# Altium footprint library TCAL9539RTWR.PcbLib: 3 footprints
Each footprint in its own frame and in the unit in brackets; x right, y up, seen from the top. Pads: shape width x height; smd on the part's side, far side on the other; paste and mask are expansions set on the pad; w line width, h text height; cw(c..) or ccw(c..) is an arc to the next point about the centre after c.
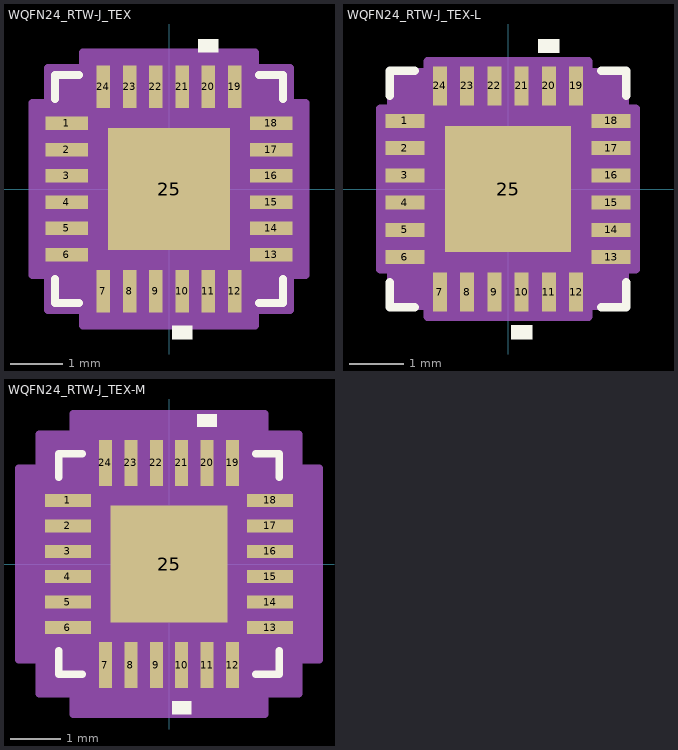
[diagram p0: the footprints below, top view; thin cyan lines are the x and y axes]

## WQFN24_RTW-J_TEX [mm]
pads (25):
  rect 0.808x0.255 smd paste+0 mask+0: 1(-1.941,1.25) 2(-1.941,0.75) 3(-1.941,0.25) 4(-1.941,-0.25) 5(-1.941,-0.75) 6(-1.941,-1.25) 13(1.941,-1.25) 14(1.941,-0.75) 15(1.941,-0.25) 16(1.941,0.25) 17(1.941,0.75) 18(1.941,1.25)
  rect 0.255x0.808 smd paste+0 mask+0: 7(-1.25,-1.941) 8(-0.75,-1.941) 9(-0.25,-1.941) 10(0.25,-1.941) 11(0.75,-1.941) 12(1.25,-1.941) 19(1.25,1.941) 20(0.75,1.941) 21(0.25,1.941) 22(-0.25,1.941) 23(-0.75,1.941) 24(-1.25,1.941)
  rect 2.311x2.311 smd paste+0 mask+0: 25(0,0)
Top Overlay:
  region: 0.44,-2.599 0.059,-2.599 0.059,-2.853 0.44,-2.853
  region: 0.941,2.599 0.56,2.599 0.56,2.853 0.941,2.853
  lines w0.152: -2.172,-1.71 -2.172,-2.172 -1.71,-2.172 ; -2.172,1.71 -2.172,2.172 -1.71,2.172 ; 1.71,-2.172 2.172,-2.172 2.172,-1.71 ; 1.71,2.172 2.172,2.172 2.172,1.71
  text ".Designator" at -3.492,-0.635 h1.27
Mechanical 13:
  lines w0.025: -2.045,0.775 -0.775,2.045 ; -2.045,-2.045 2.045,-2.045 ; -2.045,-2.045 -2.045,2.045 ; -2.045,-2.045 -2.045,-2.045 ; -2.045,-1.402 -2.045,-1.098 ; -2.045,-1.402 -2.045,-1.098 ; -2.045,-1.402 -2.045,-1.402 ; -2.045,-1.098 -2.045,-1.098 ; -2.045,-0.902 -2.045,-0.598 ; -2.045,-0.902 -2.045,-0.598 ; -2.045,-0.902 -2.045,-0.902 ; -2.045,-0.598 -2.045,-0.598 ; -2.045,-0.402 -2.045,-0.098 ; -2.045,-0.402 -2.045,-0.098 ; -2.045,-0.402 -2.045,-0.402 ; -2.045,-0.098 -2.045,-0.098 ; -2.045,0.098 -2.045,0.402 ; -2.045,0.098 -2.045,0.402 ; -2.045,0.098 -2.045,0.098 ; -2.045,0.402 -2.045,0.402 ; -2.045,0.598 -2.045,0.902 ; -2.045,0.598 -2.045,0.902 ; -2.045,0.598 -2.045,0.598 ; -2.045,0.902 -2.045,0.902 ; -2.045,1.098 -2.045,1.402 ; -2.045,1.098 -2.045,1.402 ; -2.045,1.098 -2.045,1.098 ; -2.045,1.402 -2.045,1.402 ; -2.045,2.045 2.045,2.045 ; -2.045,2.045 -2.045,2.045 ; -1.402,-2.045 -1.098,-2.045 ; -1.402,-2.045 -1.402,-2.045 ; -1.402,-2.045 -1.098,-2.045 ; -1.402,2.045 -1.098,2.045 ; -1.402,2.045 -1.098,2.045 ; -1.402,2.045 -1.402,2.045 ; -1.098,-2.045 -1.098,-2.045 ; -1.098,2.045 -1.098,2.045 ; -0.902,-2.045 -0.598,-2.045 ; -0.902,-2.045 -0.902,-2.045 ; -0.902,-2.045 -0.598,-2.045 ; -0.902,2.045 -0.598,2.045 ; -0.902,2.045 -0.598,2.045 ; -0.902,2.045 -0.902,2.045 ; -0.598,-2.045 -0.598,-2.045 ; -0.598,2.045 -0.598,2.045 ; -0.402,-2.045 -0.098,-2.045 ; -0.402,-2.045 -0.402,-2.045 ; -0.402,-2.045 -0.098,-2.045 ; -0.402,2.045 -0.098,2.045 ; -0.402,2.045 -0.098,2.045 ; -0.402,2.045 -0.402,2.045 ; -0.098,-2.045 -0.098,-2.045 ; -0.098,2.045 -0.098,2.045 ; 0.098,-2.045 0.402,-2.045 ; 0.098,-2.045 0.098,-2.045 ; 0.098,-2.045 0.402,-2.045 ; 0.098,2.045 0.402,2.045 ; 0.098,2.045 0.402,2.045 ; 0.098,2.045 0.098,2.045 ; 0.402,-2.045 0.402,-2.045 ; 0.402,2.045 0.402,2.045 ; 0.598,-2.045 0.902,-2.045 ; 0.598,-2.045 0.598,-2.045 ; 0.598,-2.045 0.902,-2.045 ; 0.598,2.045 0.902,2.045 ; 0.598,2.045 0.902,2.045 ; 0.598,2.045 0.598,2.045 ; 0.902,-2.045 0.902,-2.045 ; 0.902,2.045 0.902,2.045 ; 1.098,-2.045 1.402,-2.045 ; 1.098,-2.045 1.098,-2.045 ; 1.098,-2.045 1.402,-2.045 ; 1.098,2.045 1.402,2.045 ; 1.098,2.045 1.402,2.045 ; 1.098,2.045 1.098,2.045 ; 1.402,-2.045 1.402,-2.045 ; 1.402,2.045 1.402,2.045 ; 2.045,-2.045 2.045,-2.045 ; 2.045,-2.045 2.045,2.045 ; 2.045,-1.402 2.045,-1.098 ; 2.045,-1.402 2.045,-1.402 ; 2.045,-1.402 2.045,-1.098 ; 2.045,-1.098 2.045,-1.098 ; 2.045,-0.902 2.045,-0.598 ; 2.045,-0.902 2.045,-0.902 ; 2.045,-0.902 2.045,-0.598 ; 2.045,-0.598 2.045,-0.598 ; 2.045,-0.402 2.045,-0.098 ; 2.045,-0.402 2.045,-0.402 ; 2.045,-0.402 2.045,-0.098 ; 2.045,-0.098 2.045,-0.098 ; 2.045,0.098 2.045,0.402 ; 2.045,0.098 2.045,0.098 ; 2.045,0.098 2.045,0.402 ; 2.045,0.402 2.045,0.402 ; 2.045,0.598 2.045,0.902 ; 2.045,0.598 2.045,0.598 ; 2.045,0.598 2.045,0.902 ; 2.045,0.902 2.045,0.902 ; 2.045,1.098 2.045,1.402 ; 2.045,1.098 2.045,1.098 ; 2.045,1.098 2.045,1.402 ; 2.045,1.402 2.045,1.402 ; 2.045,2.045 2.045,2.045
  text ".Designator" at -3.492,-0.635 h1.27
Mechanical 15:
  region: -1.631,-2.299 -2.299,-2.299 -2.299,-1.631 -2.599,-1.631 -2.599,1.631 -2.299,1.631 -2.299,2.299 -1.631,2.299 -1.631,2.599 1.631,2.599 1.631,2.299 2.299,2.299 2.299,1.631 2.599,1.631 2.599,-1.631 2.299,-1.631 2.299,-2.299 1.631,-2.299 1.631,-2.599 -1.631,-2.599
  lines w0.152: -2.599,-1.631 -2.299,-1.631 -2.299,-2.299 -1.631,-2.299 -1.631,-2.599 1.631,-2.599 1.631,-2.299 2.299,-2.299 2.299,-1.631 2.599,-1.631 2.599,1.631 2.299,1.631 2.299,2.299 1.631,2.299 1.631,2.599 -1.631,2.599 -1.631,2.299 -2.299,2.299 -2.299,1.631 -2.599,1.631 -2.599,-1.631
3D body "WQFN24_RTW-J_TEX.step": height 0.81, standoff 0, extent -2.045,-2.045 2.045,2.045

## WQFN24_RTW-J_TEX-L [mm]
pads (25):
  rect 0.708x0.255 smd paste+0 mask+0: 1(-1.891,1.25) 2(-1.891,0.75) 3(-1.891,0.25) 4(-1.891,-0.25) 5(-1.891,-0.75) 6(-1.891,-1.25) 13(1.891,-1.25) 14(1.891,-0.75) 15(1.891,-0.25) 16(1.891,0.25) 17(1.891,0.75) 18(1.891,1.25)
  rect 0.255x0.708 smd paste+0 mask+0: 7(-1.25,-1.891) 8(-0.75,-1.891) 9(-0.25,-1.891) 10(0.25,-1.891) 11(0.75,-1.891) 12(1.25,-1.891) 19(1.25,1.891) 20(0.75,1.891) 21(0.25,1.891) 22(-0.25,1.891) 23(-0.75,1.891) 24(-1.25,1.891)
  rect 2.311x2.311 smd paste+0 mask+0: 25(0,0)
Top Overlay:
  region: 0.44,-2.499 0.059,-2.499 0.059,-2.753 0.44,-2.753
  region: 0.941,2.499 0.56,2.499 0.56,2.753 0.941,2.753
  lines w0.152: -2.172,-1.71 -2.172,-2.172 -1.71,-2.172 ; -2.172,1.71 -2.172,2.172 -1.71,2.172 ; 1.71,-2.172 2.172,-2.172 2.172,-1.71 ; 1.71,2.172 2.172,2.172 2.172,1.71
  text ".Designator" at -3.492,-0.635 h1.27
Mechanical 13:
  lines w0.025: -2.045,0.775 -0.775,2.045 ; -2.045,-2.045 2.045,-2.045 ; -2.045,-2.045 -2.045,2.045 ; -2.045,-2.045 -2.045,-2.045 ; -2.045,-1.402 -2.045,-1.098 ; -2.045,-1.402 -2.045,-1.098 ; -2.045,-1.402 -2.045,-1.402 ; -2.045,-1.098 -2.045,-1.098 ; -2.045,-0.902 -2.045,-0.598 ; -2.045,-0.902 -2.045,-0.598 ; -2.045,-0.902 -2.045,-0.902 ; -2.045,-0.598 -2.045,-0.598 ; -2.045,-0.402 -2.045,-0.098 ; -2.045,-0.402 -2.045,-0.098 ; -2.045,-0.402 -2.045,-0.402 ; -2.045,-0.098 -2.045,-0.098 ; -2.045,0.098 -2.045,0.402 ; -2.045,0.098 -2.045,0.402 ; -2.045,0.098 -2.045,0.098 ; -2.045,0.402 -2.045,0.402 ; -2.045,0.598 -2.045,0.902 ; -2.045,0.598 -2.045,0.902 ; -2.045,0.598 -2.045,0.598 ; -2.045,0.902 -2.045,0.902 ; -2.045,1.098 -2.045,1.402 ; -2.045,1.098 -2.045,1.402 ; -2.045,1.098 -2.045,1.098 ; -2.045,1.402 -2.045,1.402 ; -2.045,2.045 2.045,2.045 ; -2.045,2.045 -2.045,2.045 ; -1.402,-2.045 -1.098,-2.045 ; -1.402,-2.045 -1.402,-2.045 ; -1.402,-2.045 -1.098,-2.045 ; -1.402,2.045 -1.098,2.045 ; -1.402,2.045 -1.098,2.045 ; -1.402,2.045 -1.402,2.045 ; -1.098,-2.045 -1.098,-2.045 ; -1.098,2.045 -1.098,2.045 ; -0.902,-2.045 -0.598,-2.045 ; -0.902,-2.045 -0.902,-2.045 ; -0.902,-2.045 -0.598,-2.045 ; -0.902,2.045 -0.598,2.045 ; -0.902,2.045 -0.598,2.045 ; -0.902,2.045 -0.902,2.045 ; -0.598,-2.045 -0.598,-2.045 ; -0.598,2.045 -0.598,2.045 ; -0.402,-2.045 -0.098,-2.045 ; -0.402,-2.045 -0.402,-2.045 ; -0.402,-2.045 -0.098,-2.045 ; -0.402,2.045 -0.098,2.045 ; -0.402,2.045 -0.098,2.045 ; -0.402,2.045 -0.402,2.045 ; -0.098,-2.045 -0.098,-2.045 ; -0.098,2.045 -0.098,2.045 ; 0.098,-2.045 0.402,-2.045 ; 0.098,-2.045 0.098,-2.045 ; 0.098,-2.045 0.402,-2.045 ; 0.098,2.045 0.402,2.045 ; 0.098,2.045 0.402,2.045 ; 0.098,2.045 0.098,2.045 ; 0.402,-2.045 0.402,-2.045 ; 0.402,2.045 0.402,2.045 ; 0.598,-2.045 0.902,-2.045 ; 0.598,-2.045 0.598,-2.045 ; 0.598,-2.045 0.902,-2.045 ; 0.598,2.045 0.902,2.045 ; 0.598,2.045 0.902,2.045 ; 0.598,2.045 0.598,2.045 ; 0.902,-2.045 0.902,-2.045 ; 0.902,2.045 0.902,2.045 ; 1.098,-2.045 1.402,-2.045 ; 1.098,-2.045 1.098,-2.045 ; 1.098,-2.045 1.402,-2.045 ; 1.098,2.045 1.402,2.045 ; 1.098,2.045 1.402,2.045 ; 1.098,2.045 1.098,2.045 ; 1.402,-2.045 1.402,-2.045 ; 1.402,2.045 1.402,2.045 ; 2.045,-2.045 2.045,-2.045 ; 2.045,-2.045 2.045,2.045 ; 2.045,-1.402 2.045,-1.098 ; 2.045,-1.402 2.045,-1.402 ; 2.045,-1.402 2.045,-1.098 ; 2.045,-1.098 2.045,-1.098 ; 2.045,-0.902 2.045,-0.598 ; 2.045,-0.902 2.045,-0.902 ; 2.045,-0.902 2.045,-0.598 ; 2.045,-0.598 2.045,-0.598 ; 2.045,-0.402 2.045,-0.098 ; 2.045,-0.402 2.045,-0.402 ; 2.045,-0.402 2.045,-0.098 ; 2.045,-0.098 2.045,-0.098 ; 2.045,0.098 2.045,0.402 ; 2.045,0.098 2.045,0.098 ; 2.045,0.098 2.045,0.402 ; 2.045,0.402 2.045,0.402 ; 2.045,0.598 2.045,0.902 ; 2.045,0.598 2.045,0.598 ; 2.045,0.598 2.045,0.902 ; 2.045,0.902 2.045,0.902 ; 2.045,1.098 2.045,1.402 ; 2.045,1.098 2.045,1.098 ; 2.045,1.098 2.045,1.402 ; 2.045,1.402 2.045,1.402 ; 2.045,2.045 2.045,2.045
  text ".Designator" at -3.492,-0.635 h1.27
Mechanical 15:
  region: -1.479,-2.146 -2.146,-2.146 -2.146,-1.479 -2.346,-1.479 -2.346,1.479 -2.146,1.479 -2.146,2.146 -1.479,2.146 -1.479,2.346 1.479,2.346 1.479,2.146 2.146,2.146 2.146,1.479 2.346,1.479 2.346,-1.479 2.146,-1.479 2.146,-2.146 1.479,-2.146 1.479,-2.346 -1.479,-2.346
  lines w0.152: -2.346,-1.479 -2.146,-1.479 -2.146,-2.146 -1.479,-2.146 -1.479,-2.346 1.479,-2.346 1.479,-2.146 2.146,-2.146 2.146,-1.479 2.346,-1.479 2.346,1.479 2.146,1.479 2.146,2.146 1.479,2.146 1.479,2.346 -1.479,2.346 -1.479,2.146 -2.146,2.146 -2.146,1.479 -2.346,1.479 -2.346,-1.479
3D body "WQFN24_RTW-J_TEX.step": height 0.81, standoff 0, extent -2.045,-2.045 2.045,2.045

## WQFN24_RTW-J_TEX-M [mm]
pads (25):
  rect 0.908x0.255 smd paste+0 mask+0: 1(-1.991,1.25) 2(-1.991,0.75) 3(-1.991,0.25) 4(-1.991,-0.25) 5(-1.991,-0.75) 6(-1.991,-1.25) 13(1.991,-1.25) 14(1.991,-0.75) 15(1.991,-0.25) 16(1.991,0.25) 17(1.991,0.75) 18(1.991,1.25)
  rect 0.255x0.908 smd paste+0 mask+0: 7(-1.25,-1.991) 8(-0.75,-1.991) 9(-0.25,-1.991) 10(0.25,-1.991) 11(0.75,-1.991) 12(1.25,-1.991) 19(1.25,1.991) 20(0.75,1.991) 21(0.25,1.991) 22(-0.25,1.991) 23(-0.75,1.991) 24(-1.25,1.991)
  rect 2.311x2.311 smd paste+0 mask+0: 25(0,0)
Top Overlay:
  region: 0.44,-2.699 0.059,-2.699 0.059,-2.953 0.44,-2.953
  region: 0.941,2.699 0.56,2.699 0.56,2.953 0.941,2.953
  lines w0.152: -2.172,-1.71 -2.172,-2.172 -1.71,-2.172 ; -2.172,1.71 -2.172,2.172 -1.71,2.172 ; 1.71,-2.172 2.172,-2.172 2.172,-1.71 ; 1.71,2.172 2.172,2.172 2.172,1.71
  text ".Designator" at -3.492,-0.635 h1.27
Mechanical 13:
  lines w0.025: -2.045,0.775 -0.775,2.045 ; -2.045,-2.045 2.045,-2.045 ; -2.045,-2.045 -2.045,2.045 ; -2.045,-2.045 -2.045,-2.045 ; -2.045,-1.402 -2.045,-1.098 ; -2.045,-1.402 -2.045,-1.098 ; -2.045,-1.402 -2.045,-1.402 ; -2.045,-1.098 -2.045,-1.098 ; -2.045,-0.902 -2.045,-0.598 ; -2.045,-0.902 -2.045,-0.598 ; -2.045,-0.902 -2.045,-0.902 ; -2.045,-0.598 -2.045,-0.598 ; -2.045,-0.402 -2.045,-0.098 ; -2.045,-0.402 -2.045,-0.098 ; -2.045,-0.402 -2.045,-0.402 ; -2.045,-0.098 -2.045,-0.098 ; -2.045,0.098 -2.045,0.402 ; -2.045,0.098 -2.045,0.402 ; -2.045,0.098 -2.045,0.098 ; -2.045,0.402 -2.045,0.402 ; -2.045,0.598 -2.045,0.902 ; -2.045,0.598 -2.045,0.902 ; -2.045,0.598 -2.045,0.598 ; -2.045,0.902 -2.045,0.902 ; -2.045,1.098 -2.045,1.402 ; -2.045,1.098 -2.045,1.402 ; -2.045,1.098 -2.045,1.098 ; -2.045,1.402 -2.045,1.402 ; -2.045,2.045 2.045,2.045 ; -2.045,2.045 -2.045,2.045 ; -1.402,-2.045 -1.098,-2.045 ; -1.402,-2.045 -1.402,-2.045 ; -1.402,-2.045 -1.098,-2.045 ; -1.402,2.045 -1.098,2.045 ; -1.402,2.045 -1.098,2.045 ; -1.402,2.045 -1.402,2.045 ; -1.098,-2.045 -1.098,-2.045 ; -1.098,2.045 -1.098,2.045 ; -0.902,-2.045 -0.598,-2.045 ; -0.902,-2.045 -0.902,-2.045 ; -0.902,-2.045 -0.598,-2.045 ; -0.902,2.045 -0.598,2.045 ; -0.902,2.045 -0.598,2.045 ; -0.902,2.045 -0.902,2.045 ; -0.598,-2.045 -0.598,-2.045 ; -0.598,2.045 -0.598,2.045 ; -0.402,-2.045 -0.098,-2.045 ; -0.402,-2.045 -0.402,-2.045 ; -0.402,-2.045 -0.098,-2.045 ; -0.402,2.045 -0.098,2.045 ; -0.402,2.045 -0.098,2.045 ; -0.402,2.045 -0.402,2.045 ; -0.098,-2.045 -0.098,-2.045 ; -0.098,2.045 -0.098,2.045 ; 0.098,-2.045 0.402,-2.045 ; 0.098,-2.045 0.098,-2.045 ; 0.098,-2.045 0.402,-2.045 ; 0.098,2.045 0.402,2.045 ; 0.098,2.045 0.402,2.045 ; 0.098,2.045 0.098,2.045 ; 0.402,-2.045 0.402,-2.045 ; 0.402,2.045 0.402,2.045 ; 0.598,-2.045 0.902,-2.045 ; 0.598,-2.045 0.598,-2.045 ; 0.598,-2.045 0.902,-2.045 ; 0.598,2.045 0.902,2.045 ; 0.598,2.045 0.902,2.045 ; 0.598,2.045 0.598,2.045 ; 0.902,-2.045 0.902,-2.045 ; 0.902,2.045 0.902,2.045 ; 1.098,-2.045 1.402,-2.045 ; 1.098,-2.045 1.098,-2.045 ; 1.098,-2.045 1.402,-2.045 ; 1.098,2.045 1.402,2.045 ; 1.098,2.045 1.402,2.045 ; 1.098,2.045 1.098,2.045 ; 1.402,-2.045 1.402,-2.045 ; 1.402,2.045 1.402,2.045 ; 2.045,-2.045 2.045,-2.045 ; 2.045,-2.045 2.045,2.045 ; 2.045,-1.402 2.045,-1.098 ; 2.045,-1.402 2.045,-1.402 ; 2.045,-1.402 2.045,-1.098 ; 2.045,-1.098 2.045,-1.098 ; 2.045,-0.902 2.045,-0.598 ; 2.045,-0.902 2.045,-0.902 ; 2.045,-0.902 2.045,-0.598 ; 2.045,-0.598 2.045,-0.598 ; 2.045,-0.402 2.045,-0.098 ; 2.045,-0.402 2.045,-0.402 ; 2.045,-0.402 2.045,-0.098 ; 2.045,-0.098 2.045,-0.098 ; 2.045,0.098 2.045,0.402 ; 2.045,0.098 2.045,0.098 ; 2.045,0.098 2.045,0.402 ; 2.045,0.402 2.045,0.402 ; 2.045,0.598 2.045,0.902 ; 2.045,0.598 2.045,0.598 ; 2.045,0.598 2.045,0.902 ; 2.045,0.902 2.045,0.902 ; 2.045,1.098 2.045,1.402 ; 2.045,1.098 2.045,1.098 ; 2.045,1.098 2.045,1.402 ; 2.045,1.402 2.045,1.402 ; 2.045,2.045 2.045,2.045
  text ".Designator" at -3.492,-0.635 h1.27
Mechanical 15:
  region: -1.885,-2.553 -2.553,-2.553 -2.553,-1.885 -2.953,-1.885 -2.953,1.885 -2.553,1.885 -2.553,2.553 -1.885,2.553 -1.885,2.953 1.885,2.953 1.885,2.553 2.553,2.553 2.553,1.885 2.953,1.885 2.953,-1.885 2.553,-1.885 2.553,-2.553 1.885,-2.553 1.885,-2.953 -1.885,-2.953
  lines w0.152: -2.953,-1.885 -2.553,-1.885 -2.553,-2.553 -1.885,-2.553 -1.885,-2.953 1.885,-2.953 1.885,-2.553 2.553,-2.553 2.553,-1.885 2.953,-1.885 2.953,1.885 2.553,1.885 2.553,2.553 1.885,2.553 1.885,2.953 -1.885,2.953 -1.885,2.553 -2.553,2.553 -2.553,1.885 -2.953,1.885 -2.953,-1.885
3D body "WQFN24_RTW-J_TEX.step": height 0.81, standoff 0, extent -2.045,-2.045 2.045,2.045